# Altium footprint library GO_KART_CONTROLLER.PcbLib: 18 footprints (part 1 of 2)
Each footprint in its own frame and in the unit in brackets; x right, y up, seen from the top. Pads: shape width x height; smd on the part's side, far side on the other; paste and mask are expansions set on the pad; w line width, h text height; cw(c..) or ccw(c..) is an arc to the next point about the centre after c.
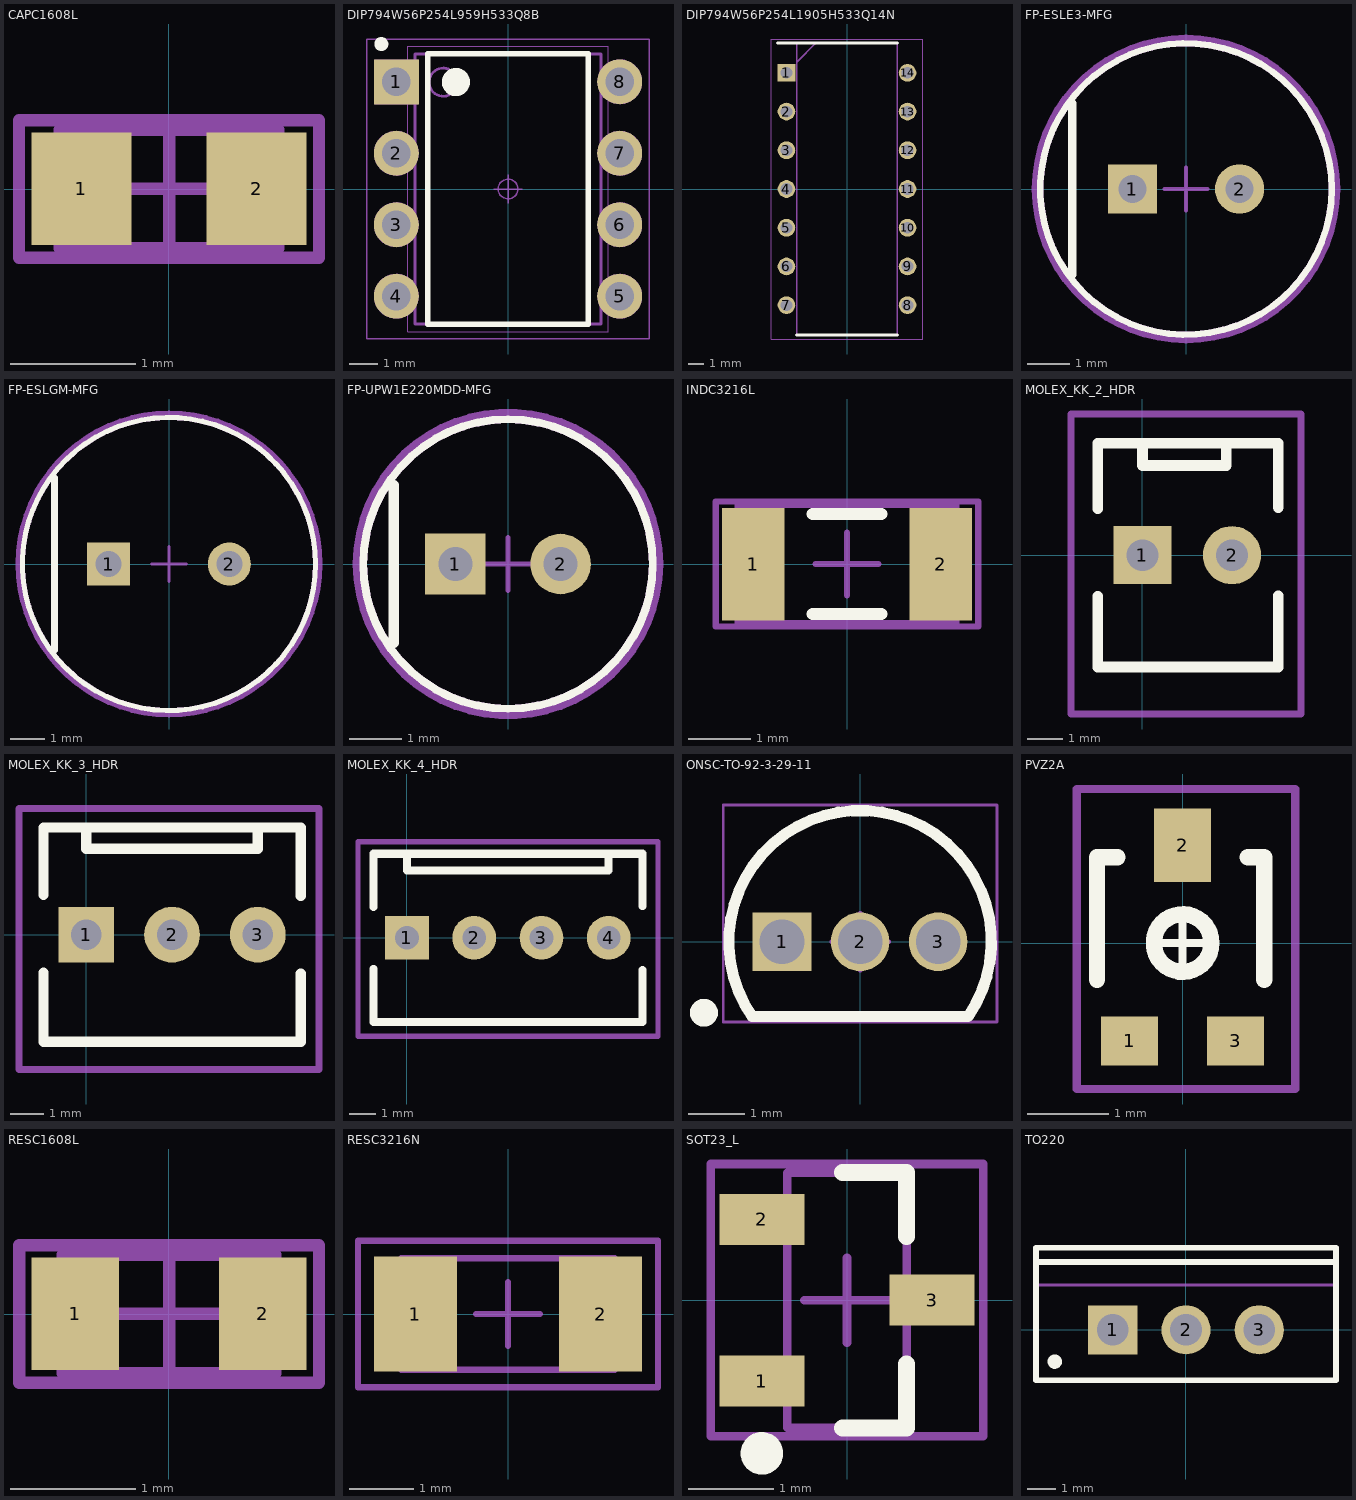
[diagram p0: the footprints below, top view; thin cyan lines are the x and y axes]

## CAPC1608L [mm]
pads (2):
  rect 0.8x0.9 smd: 1(-0.7,0) 2(0.7,0)
Mechanical 13:
  lines w0.1: -0.875,-0.475 0.875,-0.475 0.875,0.475 -0.875,0.475 -0.875,-0.475
Mechanical 15:
  lines w0.1: -0.475,0 0.475,0 ; 0,-0.475 0,0.475 ; -1.2,-0.55 1.2,-0.55 1.2,0.55 -1.2,0.55 -1.2,-0.55
3D body: height 0.85, standoff 0, extent -0.875,-0.475 0.875,0.475

## DIP794W56P254L959H533Q8B [mm]
pads (8):
  rect 1.6x1.6 hole 1: 1(-3.97,3.81)
  round 1.6 hole 1: 2(-3.97,1.27) 3(-3.97,-1.27) 4(-3.97,-3.81) 5(3.97,-3.81) 6(3.97,-1.27) 7(3.97,1.27) 8(3.97,3.81)
Top Overlay:
  circle w0.5: c-1.85,3.8 r0.25
  circle w0.25: c-4.5,5.15 r0.125
  lines w0.2: -2.85,-4.8 2.85,-4.8 2.85,4.8 -2.85,4.8 -2.85,-4.8
Mechanical 13:
  circle w0.1: c-2.302,3.795 r0.5
  circle w0.1: c-3.97,1.27 r0.75
  circle w0.1: c-3.97,-1.27 r0.75
  circle w0.1: c-3.97,-3.81 r0.75
  circle w0.1: c3.97,-3.81 r0.75
  circle w0.1: c3.97,-1.27 r0.75
  circle w0.1: c3.97,1.27 r0.75
  circle w0.1: c3.97,3.81 r0.75
  lines w0.1: -4.72,3.06 -4.72,4.56 -3.22,4.56 -3.22,3.06 -4.72,3.06 ; -3.302,-4.795 3.302,-4.795 3.302,4.795 -3.302,4.795 -3.302,-4.795
Mechanical 15:
  circle w0.05: c0,0 r0.35
  lines w0.001: -3.555,-5.08 3.555,-5.08 3.555,5.08 -3.555,5.08 -3.555,-5.08
  lines w0.05: -0.5,0 0.5,0 ; 0,-0.5 0,0.5 ; -5.02,-5.33 5.02,-5.33 5.02,5.33 -5.02,5.33 -5.02,-5.33
3D body "UC3843BNG.stp": height 5.33, standoff -3.5, extent -4.11,-4.795 4.11,4.795

## DIP794W56P254L1905H533Q14N [mm]
pads (14):
  rect 1.159x1.159 hole 0.759: 1(-3.969,7.62)
  round 1.159 hole 0.759: 2(-3.969,5.08) 3(-3.969,2.54) 4(-3.969,0) 5(-3.969,-2.54) 6(-3.969,-5.08) 7(-3.969,-7.62) 8(3.969,-7.62) 9(3.969,-5.08) 10(3.969,-2.54) 11(3.969,0) 12(3.969,2.54) 13(3.969,5.08) 14(3.969,7.62)
Top Overlay:
  lines w0.2: -4.548,9.588 3.302,9.588 ; -3.302,-9.588 3.302,-9.588
Mechanical 13:
  lines w0.1: -3.302,8.318 -2.032,9.588 ; -3.302,-9.588 -3.302,9.588 3.302,9.588 3.302,-9.588 -3.302,-9.588
Mechanical 15:
  lines w0.05: -4.957,-9.838 -4.957,9.838 4.957,9.838 4.957,-9.838 -4.957,-9.838
3D body "LMC6484IN.stp": height 5.33, standoff -3.5, extent -4.109,-9.525 4.109,9.525

## FP-ESLE3-MFG [mm]
pads (2):
  rect 1.15x1.15 hole 0.65 paste-2539.97 mask+0: 1(-1.25,0)
  round 1.15 hole 0.65 paste-2539.97 mask+0: 2(1.25,0)
Top Overlay:
  circle w0.15: c0,0 r3.4
  lines w0.2: -2.65,-2 -2.65,2
Top 3D Body:
  circle w0.15: c0,0 r3.4
Top Courtyard:
  lines w0.2: -3.5,0 ccw(c0,0) 3.5,0 ccw(c0,0) -3.5,0
Top Assembly:
Top Component Center:
  lines w0.1: -0.5,0 0.5,0 ; 0,-0.5 0,0.5
3D body "Cap_kemet_ESL106M100AE3AA_eec.STEP": height 0.25, standoff 0, extent -3.5,-3.5 3.5,3.5

## FP-ESLGM-MFG [mm]
pads (2):
  rect 1.25x1.25 hole 0.75 paste-2539.97 mask+0: 1(-1.75,0)
  round 1.25 hole 0.75 paste-2539.97 mask+0: 2(1.75,0)
Top Overlay:
  circle w0.15: c0,0 r4.25
  lines w0.2: -3.325,-2.5 -3.325,2.5
Top 3D Body:
  circle w0.15: c0,0 r4.25
Top Courtyard:
  lines w0.2: -4.35,0 ccw(c0,0) 4.35,0 ccw(c0,0) -4.35,0
Top Assembly:
Top Component Center:
  lines w0.1: -0.5,0 0.5,0 ; 0,-0.5 0,0.5
3D body "Cap_KEMET_ESL107M050AGMAA_eec.STEP": height 0.25, standoff 0, extent -4.35,-4.35 4.35,4.35

## FP-UPW1E220MDD-MFG [mm]
pads (2):
  rect 1.15x1.15 hole 0.65 paste-2539.97 mask+0: 1(-1,0)
  round 1.15 hole 0.65 paste-2539.97 mask+0: 2(1,0)
Top Overlay:
  circle w0.15: c0,0 r2.75
  lines w0.2: -2.175,-1.5 -2.175,1.5
Top 3D Body:
  circle w0.15: c0,0 r2.75
Top Courtyard:
  lines w0.2: -2.85,0 ccw(c0,0) 2.85,0 ccw(c0,0) -2.85,0
Top Assembly:
Top Component Center:
  lines w0.1: -0.5,0 0.5,0 ; 0,-0.5 0,0.5
3D body "Cap_Nichicon_UPW1E220MDD_eec.STEP": height 0.25, standoff 0, extent -2.85,-2.85 2.85,2.85

## INDC3216L [mm]
pads (2):
  rect 1x1.8 smd: 1(-1.5,0) 2(1.5,0)
Top Overlay:
  lines w0.2: -0.55,-0.8 0.55,-0.8 ; -0.55,0.8 0.55,0.8
Mechanical 13:
  lines w0.1: -1.75,-0.95 -1.75,0.95 1.75,0.95 1.75,-0.95 -1.75,-0.95
Mechanical 15:
  lines w0.1: -0.5,0 0.5,0 ; 0,-0.5 0,0.5 ; -2.1,-1 -2.1,1 2.1,1 2.1,-1 -2.1,-1
3D body: height 1.9, standoff 0, extent -1.75,-0.95 1.75,0.95

## MOLEX_KK_2_HDR [mil]
pads (2):
  rect 65x65 hole 35.43: 1(0,0)
  round 65 hole 35.43: 2(100,0)
Top Overlay:
  lines w11.81: -50,-125 -50,-46.06 ; -50,51.97 -50,125 ; 151.57,-125 151.57,-45.28 ; 151.57,53.15 151.57,125
  lines w12: -50,-125 151.57,-125 ; -50,125 151.57,125 ; 0,125 0,100 93.5,100 93.5,125
Mechanical 15:
  lines w7.87: -79.57,-177.33 176.82,-177.33 176.82,157.52 -79.57,157.52 -79.57,-177.33
3D body: height 629.92, standoff 0, extent -43.99,-120.52 145.68,118.93

## MOLEX_KK_3_HDR [mil]
pads (3):
  rect 65x65 hole 35.43: 1(0,0)
  round 65 hole 35.43: 2(100,0) 3(200,0)
Top Overlay:
  lines w11.81: -50,-125 -50,-44.49 ; -50,46.46 -50,125 ; 250,-125 250,-45.28 ; 250,45.28 250,125
  lines w12: -50,-125 250,-125 ; -50,125 250,125 225,125 ; 0,125 0,100 200,100 200,125
Mechanical 15:
  lines w7.87: -78.5,-157.16 271.33,-157.16 271.33,146.98 -78.5,146.98 -78.5,-157.16
3D body: height 10, standoff 0, extent -43.55,-119.77 243.57,118.96

## MOLEX_KK_4_HDR [mil]
pads (4):
  rect 65x65 hole 35.43: 1(0,0)
  round 65 hole 35.43: 2(100,0) 3(200,0) 4(300,0)
Top Overlay:
  lines w11.81: -50,-125 -50,-46.06 ; -50,46.06 -50,125 ; 350,-125 350,-47.64 ; 350,46.85 350,125
  lines w12: -50,-125 350,-125 ; -50,125 350,125 ; 0,125 0,100 300,100 300,125
Mechanical 15:
  lines w7.87: -72.76,-146.35 -72.76,142.71 373.36,142.71 373.36,-146.35 -72.76,-146.35
3D body: height 629.92, standoff 0, extent -44.27,-119.12 343.12,118.57

## ONSC-TO-92-3-29-11 [mm]
pads (3):
  rect 1.05x1.05 hole 0.8: 1(-1.397,0)
  round 1.05 hole 0.8: 2(0,0) 3(1.397,0)
Top Overlay:
  circle w0.25: c-2.794,-1.27 r0.125
  lines w0.2: -1.934,-1.335 cw(c0,0) 1.934,-1.335 -1.934,-1.335
Mechanical 13:
  lines w0.1: -1.934,-1.335 cw(c0,0) 1.934,-1.335 -1.934,-1.335
Mechanical 15:
  lines w0.05: -2.45,-1.435 2.45,-1.435 2.45,2.45 -2.45,2.45 -2.45,-1.435
  lines w0.1: -0.5,0 0.5,0 ; 0,-0.5 0,0.5
3D body: height 7.87, standoff 2.54, extent -2.349,-1.334 2.357,2.359

## PVZ2A [mm]
pads (3):
  rect 0.7x0.6 smd: 1(-0.65,-1.2) 3(0.65,-1.2)
  rect 0.7x0.9 smd: 2(0,1.2)
Top Overlay:
  circle w0.2: c0,0 r0.354
  lines w0.1: -0.25,0 0.25,0 ; 0,-0.25 0,0.25
  lines w0.2: -1.05,-0.45 -1.05,1.05 -0.8,1.05 ; 0.8,1.05 1,1.05 1,-0.45
Mechanical 15:
  lines w0.1: -1.299,-1.79 -1.299,1.889 1.382,1.889 1.382,-1.79 -1.299,-1.79
3D body: height 1.6, standoff 0, extent -0.949,-0.817 0.916,0.961

## RESC1608L [mm]
pads (2):
  rect 0.7x0.9 smd: 1(-0.75,0) 2(0.75,0)
Mechanical 13:
  lines w0.1: -0.85,-0.475 0.85,-0.475 0.85,0.475 -0.85,0.475 -0.85,-0.475
Mechanical 15:
  lines w0.1: -0.475,0 0.475,0 ; 0,-0.475 0,0.475 ; -1.2,-0.55 1.2,-0.55 1.2,0.55 -1.2,0.55 -1.2,-0.55
3D body: height 0.9, standoff 0, extent -0.85,-0.475 0.85,0.475

## RESC3216N [mm]
pads (2):
  rect 1.3x1.8 smd: 1(-1.45,0) 2(1.45,0)
Mechanical 13:
  lines w0.1: -1.675,-0.875 1.675,-0.875 1.675,0.875 -1.675,0.875 -1.675,-0.875
Mechanical 15:
  lines w0.1: -0.5,0 0.5,0 ; 0,-0.5 0,0.5 ; -2.35,-1.15 2.35,-1.15 2.35,1.15 -2.35,1.15 -2.35,-1.15
3D body: height 0.71, standoff 0, extent -1.675,-0.875 1.675,0.875

## SOT23_L [mm]
pads (3):
  rect 1x0.6 smd: 1(-1,-0.95) 2(-1,0.95) 3(1,0)
Top Overlay:
  circle w0.25: c-1,-1.8 r0.125
  lines w0.2: -0.05,-1.5 0.7,-1.5 0.7,-0.75 ; -0.05,1.5 0.7,1.5 0.7,0.75
Mechanical 13:
  lines w0.1: -0.7,-1.5 -0.7,1.5 0.7,1.5 0.7,-1.5 -0.7,-1.5
Mechanical 15:
  lines w0.1: -0.5,0 0.5,0 ; 0,-0.5 0,0.5 ; -1.6,-1.6 -1.6,1.6 1.6,1.6 1.6,-1.6 -1.6,-1.6
3D body: height 1.1, standoff 0, extent -0.7,-1.5 0.7,1.5

## TO220 [mm]
pads (3):
  rect 1.7x1.7 hole 1.1: 1(-2.54,0)
  round 1.7 hole 1.1: 2(0,0) 3(2.54,0)
Top Overlay:
  circle w0.25: c-4.55,-1.1 r0.125
  lines w0.2: -5.2,2.35 5.2,2.35 ; -5.2,-1.75 -5.2,2.85 5.2,2.85 5.2,-1.75 -5.2,-1.75
Mechanical 13:
  lines w0.1: -5.2,1.55 5.2,1.55 ; -5.2,-1.75 5.2,-1.75 5.2,2.85 -5.2,2.85 -5.2,-1.75
Mechanical 15:
  lines w0.1: -0.5,0 0.5,0 ; 0,-0.5 0,0.5
3D body: height 19.7, standoff 13.05, extent -5.199,1.551 5.199,2.849
3D body: height 13.05, standoff 3.5, extent -5.25,-1.8 5.25,2.9